# Altium footprint library Connectors.PcbLib: 320 footprints (part 16 of 20)
Each footprint in its own frame and in the unit in brackets; x right, y up, seen from the top. Pads: shape width x height; smd on the part's side, far side on the other; paste and mask are expansions set on the pad; w line width, h text height; cw(c..) or ccw(c..) is an arc to the next point about the centre after c.
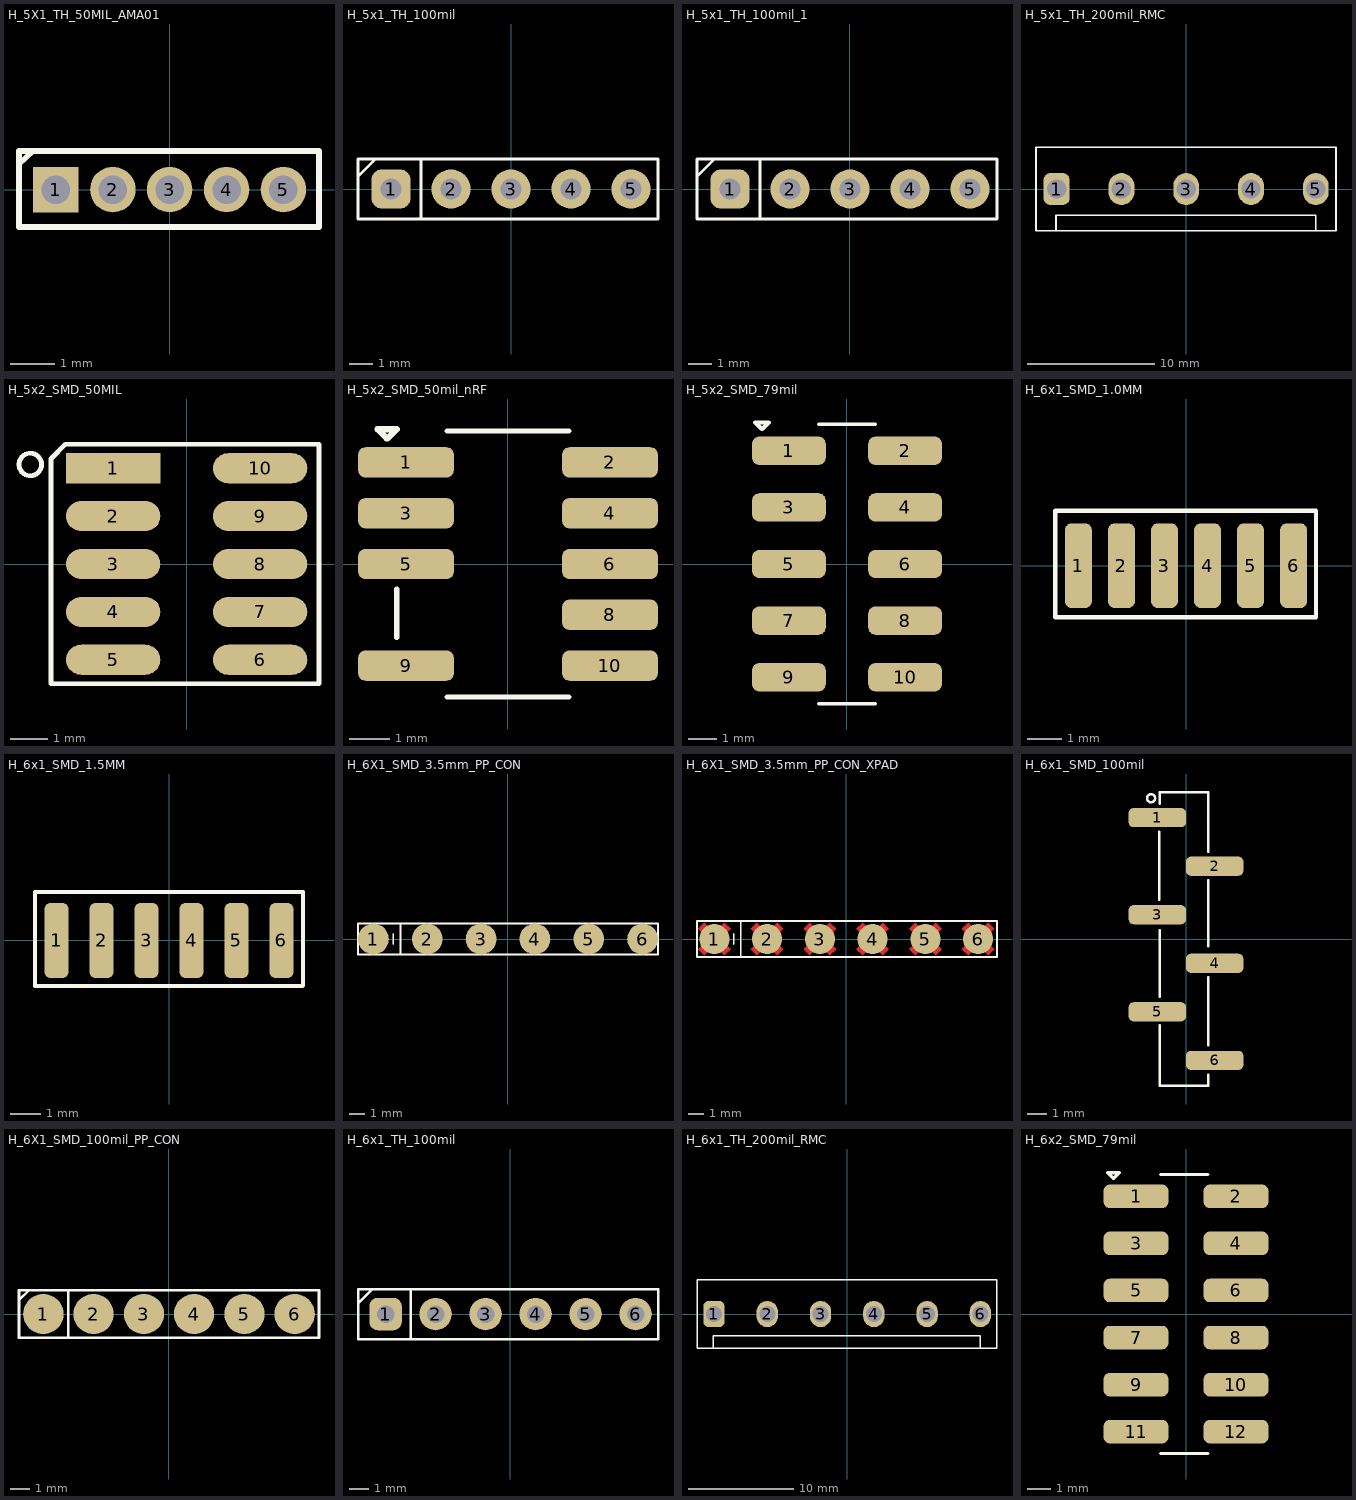
[diagram p15: the footprints below, top view; thin cyan lines are the x and y axes]

## H_5X1_TH_50MIL_AMA01 [mil] "20220517 / E.Naranjo"
pads (5):
  rect 40x40 hole 25: 1(-100,0)
  round 40 hole 25: 2(-50,0) 3(0,0) 4(50,0) 5(100,0)
Top Overlay:
  lines w5: -132.48,22.5 -120,34 ; -132.48,-32.93 131.3,-32.93 131.3,34 -132.48,34 -132.48,-32.93

## H_5x1_TH_100mil [mil] "/ 20190222 / C-A.Serna.A"
pads (5):
  rrect50% 65x65 hole 35: 1(-200,0)
  round 65 hole 35: 2(-100,0) 3(0,0) 4(100,0) 5(200,0)
Top Overlay:
  lines w5: -255,20.87 -225.87,50 ; -150,-50 -150,50 ; -255,-50 -255,50 245,50 245,-50 -255,-50

## H_5x1_TH_100mil_1 [mil] "/ 20191121 / J-P.Vargas.A"
pads (5):
  rrect50% 65x65 hole 35: 1(-200,0)
  round 65 hole 35: 2(-100,0) 3(0,0) 4(100,0) 5(200,0)
Top Overlay:
  lines w5: -255,20.87 -225.87,50 ; -150,-50 -150,50 ; -255,-50 -255,50 245,50 245,-50 -255,-50
3D body "CircuitWorks-HEADER 2_54 VERTICAL 5X.STEP": height 335.15, standoff -97.93, extent -250.01,-49.21 249.99,49.21

## H_5x1_TH_200mil_RMC [mil] "/ 20200321/ C-A.Serna.A"
pads (5):
  rrect50% 80x98.43 hole 60 unplated: 1(-400,0)
  oval 80x98.43 hole 60 unplated: 2(-200,0) 3(0,0) 4(200,0) 5(400,0)
Top Overlay:
  lines w5: -402.01,-128.66 -402.01,-81.11 400,-81.11 400,-128.66 ; -463.76,-128.66 462.4,-128.66 462.4,128.82 -463.76,128.82 -463.76,-128.66
3D body "010011054.stp": height 765.75, standoff 139.76, extent -499,-83.01 501,153.21
3D body "010085051.stp": height 582.28, standoff -166.93, extent -459.32,-124.63 458.79,125.36

## H_5x2_SMD_50MIL [mm] "/20200728/M-C.Calderon"
pads (10):
  rect 2.5x0.8 smd: 1(-1.95,2.54)
  oval 2.5x0.8 smd: 2(-1.95,1.27) 3(-1.95,0) 4(-1.95,-1.27) 5(-1.95,-2.54) 6(1.95,-2.54) 7(1.95,-1.27) 8(1.95,0) 9(1.95,1.27) 10(1.95,2.54)
Top Overlay:
  circle w0.127: c-4.15,2.64 r0.3
  lines w0.127: -0.318,3.175 3.511,3.175 3.511,-3.175 -3.601,-3.175 -3.601,2.794 -3.22,3.175 0.318,3.175
3D body "20021121-00010.stp": height 4.5, standoff 0, extent -2.75,-3.195 2.75,3.155

## H_5x2_SMD_50mil_nRF [mm] "/ 20200218/ C-A.Serna.A"
pads (9):
  rrect50% 2.4x0.76 smd: 1(-2.55,2.54) 2(2.55,2.54) 3(-2.55,1.27) 4(2.55,1.27) 5(-2.55,0) 6(2.55,0) 8(2.55,-1.27) 9(-2.55,-2.54) 10(2.55,-2.54)
Top Overlay:
  lines w0.127: -2.781,-1.841 -2.781,-0.621 ; -1.53,-3.32 1.518,-3.32 ; -1.53,3.327 1.518,3.327
  lines w0.152: -3.031,3.14 -3.26,3.369 -2.781,3.369 -3.01,3.14 ; -3.031,3.14 -3.01,3.14 ; -3.031,3.14 -3.01,3.14
3D body "Heade_10Pos_SMD_1.27mm_2row_1.27mm.stp": height 4.52, standoff 0.02, extent -2.76,-3.15 2.74,3.2
3D body "5x2_50mil_plug.step": height 6.67, standoff 1.57, extent -2.55,-5.3 1.47,5.3

## H_5x2_SMD_79mil [mm] "/ 20190909 / C-D Viveros"
pads (10):
  rrect50% 2.6x1 smd: 1(-2.05,4) 2(2.05,4) 3(-2.05,2) 4(2.05,2) 5(-2.05,0) 6(2.05,0) 7(-2.05,-2) 8(2.05,-2) 9(-2.05,-4) 10(2.05,-4)
Top Overlay:
  lines w0.127: -1,-4.937 1,-4.937 ; -1,4.936 1,4.936
  lines w0.152: -3.013,4.77 -2.992,4.77 ; -3.013,4.77 -2.992,4.77 ; -3.013,4.77 -3.242,5 -2.763,5 -2.992,4.77
3D body "57202-G52-05LFc.stp": height 6.51, standoff 0.01, extent -3.002,-5 3.003,5

## H_6x1_SMD_1.0MM [mm] "/20210810/J-E.Pachon"
pads (6):
  rrect50% 0.8x2.5 smd: 1(-3.175,0) 2(-1.905,0) 3(-0.635,0) 4(0.635,0) 5(1.905,0) 6(3.175,0)
Top Overlay:
  lines w0.127: -3.861,-1.52 -3.861,1.62 3.835,1.62 3.835,-1.52 -3.861,-1.52

## H_6x1_SMD_1.5MM [mm] "/20210113/J-E.Pachon"
pads (6):
  rrect50% 0.8x2.5 smd: 1(-3.75,0) 2(-2.25,0) 3(-0.75,0) 4(0.75,0) 5(2.25,0) 6(3.75,0)
Top Overlay:
  lines w0.127: -4.47,-1.52 4.46,-1.52 4.47,-1.51 4.47,1.62 -4.47,1.62 -4.47,-1.52

## H_6X1_SMD_3.5mm_PP_CON [mm] "/ 20190222 / C-A.Serna.A"
pads (6):
  round 2 smd mask-0.2: 1(-8.75,0) 2(-5.25,0) 3(-1.75,0) 4(1.75,0) 5(5.25,0) 6(8.75,0)
Top Overlay:
  lines w0.127: -7.46,-0.34 -7.46,0.34 ; -9.742,-0.998 -9.742,0.998 9.75,0.998 9.75,-0.998 -9.742,-0.998 ; -7,-0.998 -6.98,0.998 -7,-0.998
3D body: height 0.1, standoff 0, extent 7.758,-0.998 9.75,0.998
3D body: height 0.1, standoff 0, extent 4.258,-0.998 6.25,0.998
3D body: height 0.1, standoff 0, extent 0.758,-0.998 2.75,0.998
3D body: height 0.1, standoff 0, extent -2.742,-0.998 -0.75,0.998
3D body: height 0.1, standoff 0, extent -6.242,-0.998 -4.25,0.998
3D body: height 0.1, standoff 0, extent -9.742,-0.998 -7.75,0.998

## H_6X1_SMD_3.5mm_PP_CON_XPAD [mm] "/ 20190923/ N-A. Potosi"
pads (6):
  round 2 smd mask-0.2: 1(-8.75,0) 2(-5.25,0) 3(-1.75,0) 4(1.75,0) 5(5.25,0) 6(8.75,0)
Top Layer:
  region: -8.078,-1.096 -7.654,-0.672 -9.422,1.096 -9.846,0.672
  region: -7.654,0.672 -8.078,1.096 -9.846,-0.672 -9.422,-1.096
  region: -4.578,-1.096 -4.154,-0.672 -5.922,1.096 -6.346,0.672
  region: -4.154,0.672 -4.578,1.096 -6.346,-0.672 -5.922,-1.096
  region: -1.078,-1.096 -0.654,-0.672 -2.422,1.096 -2.846,0.672
  region: -0.654,0.672 -1.078,1.096 -2.846,-0.672 -2.422,-1.096
  region: 2.422,-1.096 2.846,-0.672 1.078,1.096 0.654,0.672
  region: 2.846,0.672 2.422,1.096 0.654,-0.672 1.078,-1.096
  region: 5.922,-1.096 6.346,-0.672 4.578,1.096 4.154,0.672
  region: 6.346,0.672 5.922,1.096 4.154,-0.672 4.578,-1.096
  region: 9.422,-1.096 9.846,-0.672 8.078,1.096 7.654,0.672
  region: 9.846,0.672 9.422,1.096 7.654,-0.672 8.078,-1.096
Top Overlay:
  lines w0.127: -7.46,-0.34 -7.46,0.34 ; -9.9,-1.2 10,-1.2 10,1.2 -9.9,1.2 -9.9,-1.2 ; -7,-1.2 -7,1.2 -7,-1.2
3D body: height 0.1, standoff 0, extent -9.742,-0.998 -7.75,0.998
3D body: height 0.1, standoff 0, extent -6.242,-0.998 -4.25,0.998
3D body: height 0.1, standoff 0, extent -2.742,-0.998 -0.75,0.998
3D body: height 0.1, standoff 0, extent 0.758,-0.998 2.75,0.998
3D body: height 0.1, standoff 0, extent 4.258,-0.998 6.25,0.998
3D body: height 0.1, standoff 0, extent 7.758,-0.998 9.75,0.998

## H_6x1_SMD_100mil [mm] "/ 20190222 / C-A.Serna.A"
pads (6):
  rrect50% 3x1 smd: 1(-1.5,6.35) 2(1.5,3.81) 3(-1.5,1.27) 4(1.5,-1.27) 5(-1.5,-3.81) 6(1.5,-6.35)
Top Overlay:
  circle w0.127: c-1.829,7.366 r0.209
  lines w0.127: -1.397,2.057 -1.397,5.613 ; -1.372,-4.521 -1.372,-7.671 1.168,-7.671 1.168,-7.112 ; -1.372,-3.023 -1.372,-2.489 -1.372,0.457 ; -1.372,7.087 -1.372,7.671 1.168,7.671 1.168,4.572 ; 1.168,-5.563 1.168,-2.007 ; 1.168,-0.381 1.168,3.073

## H_6X1_SMD_100mil_PP_CON [mil] "/ 20190222 / C-A.Serna.A"
pads (6):
  round 80 smd: 1(-250,0) 2(-150,0) 3(-50,0) 4(50,0) 5(150,0) 6(250,0)
Top Overlay:
  lines w5: -298.03,27.95 -278.74,47.24 ; -200,-47.24 -200,47.24 ; -298.43,-47.24 298.43,-47.24 298.43,47.24 -298.43,47.24 -298.43,-47.24

## H_6x1_TH_100mil [mil] "/ 20190222 / C-A.Serna.A"
pads (6):
  rrect50% 65x65 hole 35: 1(-250,0)
  round 65 hole 35: 2(-150,0) 3(-50,0) 4(50,0) 5(150,0) 6(250,0)
Top Overlay:
  lines w5: -305,20.87 -275.87,50 ; -200,-50 -200,50 ; -305,-50 295,-50 295,50 -305,50 -305,-50

## H_6x1_TH_200mil_RMC [mil] "/ 20200321/ C-A.Serna.A"
pads (6):
  rrect50% 80x98.43 hole 60 unplated: 1(-500,0)
  oval 80x98.43 hole 60 unplated: 2(-300,0) 3(-100,0) 4(100,0) 5(300,0) 6(500,0)
Top Overlay:
  lines w5: -502.01,-128.66 -502.01,-81.11 500,-81.11 500,-128.66 ; -563.76,-128.66 562.38,-128.66 562.38,128.82 -563.76,128.82 -563.76,-128.66
3D body "010085061.stp": height 578.42, standoff -170.8, extent -560.05,-125 558.06,125
3D body "010011064.stp": height 762.99, standoff 137.01, extent -599,-81.11 601,155.11

## H_6x2_SMD_79mil [mm] "/ 20200722 /C-D Viveros"
pads (12):
  rrect50% 2.75x1 smd: 1(-2.125,5) 2(2.125,5) 3(-2.125,3) 4(2.125,3) 5(-2.125,1) 6(2.125,1) 7(-2.125,-1) 8(2.125,-1) 9(-2.125,-3) 10(2.125,-3) 11(-2.125,-5) 12(2.125,-5)
Top Overlay:
  lines w0.127: -1.075,-5.936 0.925,-5.936 ; -1.075,5.936 0.925,5.936
  lines w0.152: -3.088,5.77 -3.317,6 -2.838,6 -3.067,5.77 ; -3.088,5.77 -3.067,5.77 ; -3.088,5.77 -3.067,5.77
3D body "29817.stp": height 6.02, standoff 0.05, extent -3.299,2 3.249,6
3D body "29817.stp": height 6.02, standoff 0.05, extent -3.299,-2 3.249,2
3D body "29817.stp": height 6.02, standoff 0.05, extent -3.299,-6 3.249,-2